# Altium schematic symbol library LED - GENERIC.SchLib: 1 symbol
Pins are listed as number, name and electrical type; pins without a type are passive.

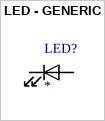
[diagram p0: symbol LED - GENERIC]

## LED - GENERIC
designator LED?
LED - GENERIC
footprint LED0603 - LITEON (Huella LED0603 - LITEON)
pins: 1 K, 2 A